# Altium footprint library Connectors.PcbLib: 63 footprints (part 1 of 4)
Each footprint in its own frame and in the unit in brackets; x right, y up, seen from the top. Pads: shape width x height; smd on the part's side, far side on the other; paste and mask are expansions set on the pad; w line width, h text height; cw(c..) or ccw(c..) is an arc to the next point about the centre after c.
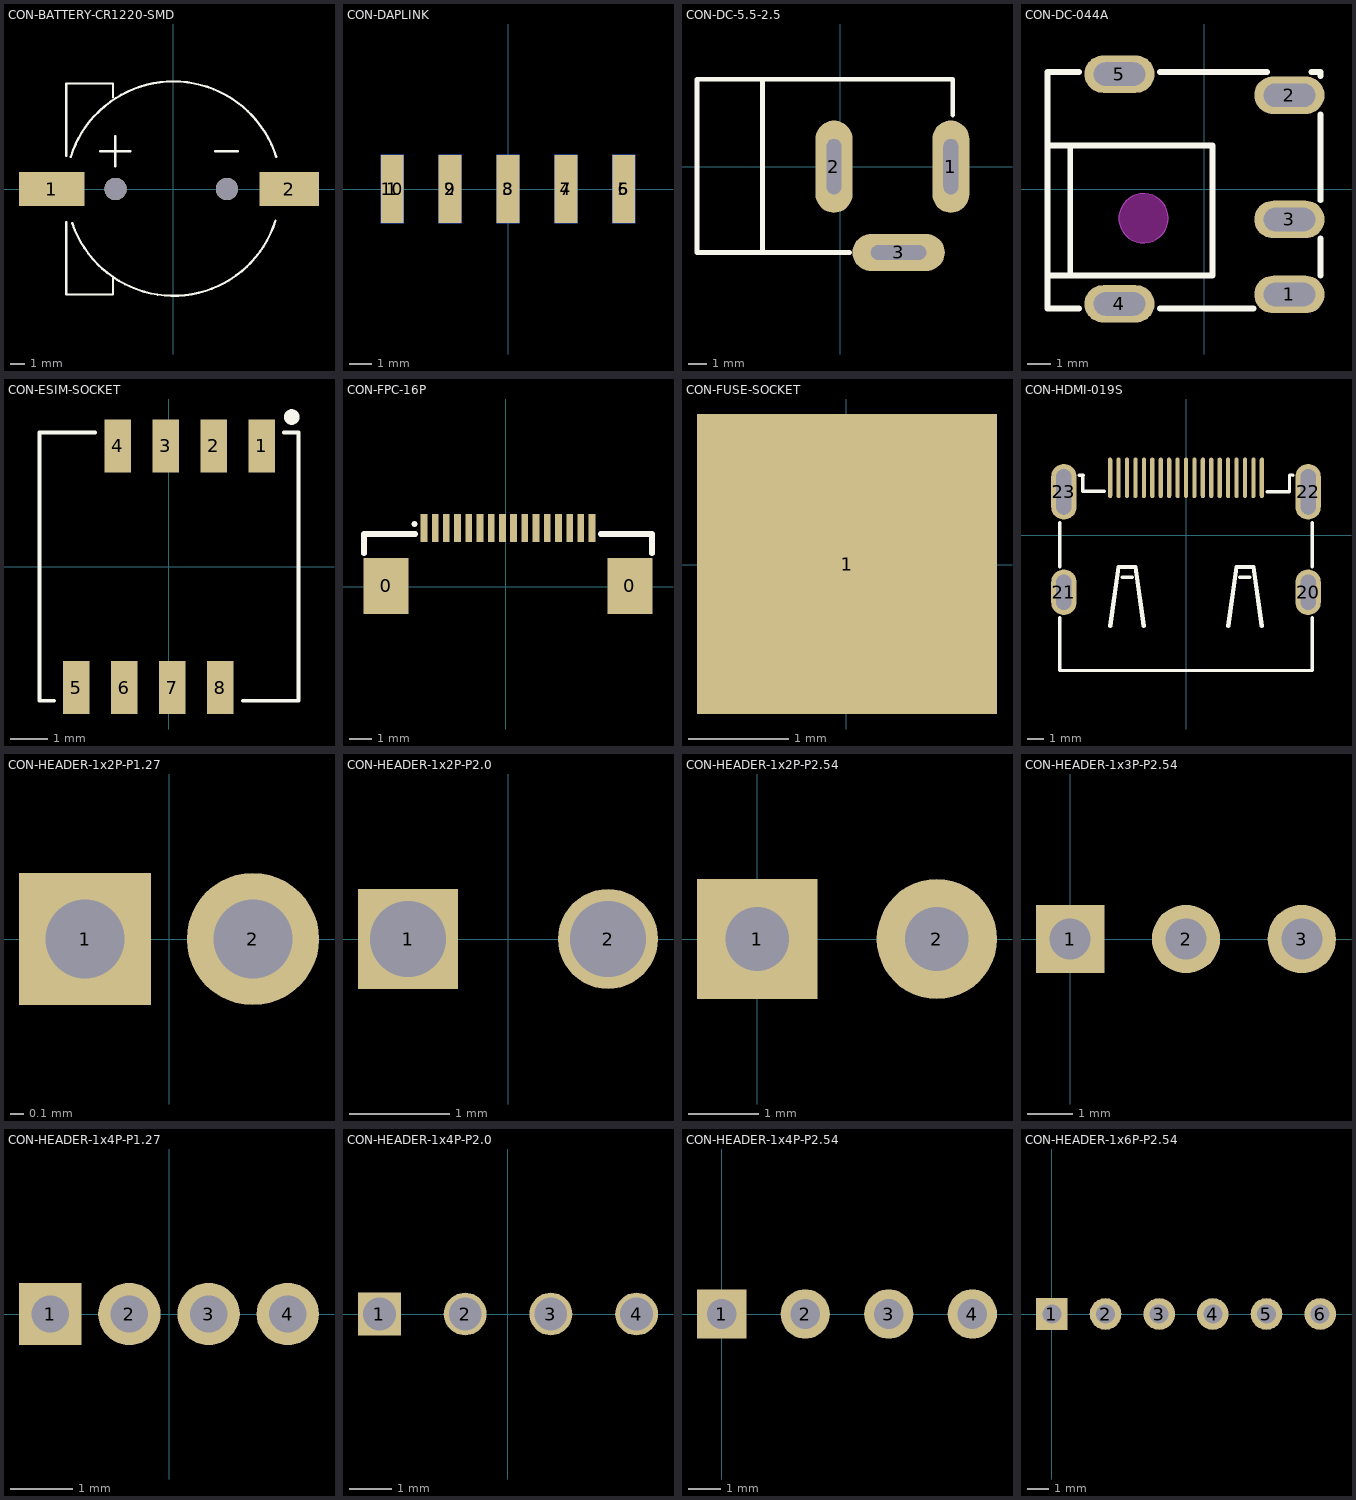
[diagram p0: the footprints below, top view; thin cyan lines are the x and y axes]

## CON-BATTERY-CR1220-SMD [mm] "CR1220 Power Connectors"
pads (4):
  rect 4.4x2.3 smd: 1(-8.2,0)
  rect 4x2.3 smd: 2(7.8,0)
  round 1.5 hole 1.5 unplated: ""(-3.9,0) ""(3.6,0)
Top Overlay:
  lines w0.15: -7.22,-2.231 -7.22,-7.112 -4.064,-7.112 -4.064,-5.912 ; -7.22,2.231 -7.22,7.112 -4.064,7.112 -4.064,6.171 ; -6.911,2.175 cw(c0,0) 6.918,2.154 ; -6.815,-2.297 ccw(c0,0) 6.871,-2.124 ; -4.928,2.54 -2.896,2.54 ; -3.912,1.524 -3.912,3.556 ; 2.819,2.54 4.343,2.54
Mechanical 15:
  circle w0.5: c-3.912,0 r0.25
  circle w0.5: c3.581,0 r0.25
3D body "User Library-Battery Holder for CR1220 SMD.step": height 4.23, standoff -0.52, extent -9.74,-7.37 9.06,7.379

## CON-DAPLINK [mm]
pads (10):
  rect 1x3 smd: 1(-5.08,0) 2(-2.54,0) 3(0,0) 4(2.54,0) 5(5.08,0)
  rect 1x3 smd far side: 6(5.08,0) 7(2.54,0) 8(0,0) 9(-2.54,0) 10(-5.08,0)
3D body "2x5 TH Vert 100mil.step": height 2.01, standoff -3.07, extent -6.35,-1.63 6.35,10.05

## CON-DC-5.5-2.5 [mm] "Connector Power socket"
pads (3):
  oval 2x5 hole 3 slot 0.8 at 0 deg mask+0.051: 1(6,0) 2(-0.33,0)
  oval 5x2 hole 3 slot 0.8 at 90 deg mask+0.051: 3(3.17,-4.65)
Top Overlay:
  lines w0.254: -4.2,-4.65 -4.2,4.65 ; 0.508,-4.65 -7.75,-4.65 -7.75,4.728 6.1,4.728 6.1,2.794
3D body "User Library-A3D-014-00008.step": height 11, standoff -4, extent -8.18,-4.541 6.17,4.609

## CON-DC-044A [mm]
pads (5):
  oval 3x1.6 hole 1 slot 2.2 at 0 deg paste-2539.97 mask+0.051: 1(3.625,-4.5) 2(3.625,4.001) 3(3.625,-1.3) 4(-3.625,-4.9) 5(-3.625,4.9)
Top Overlay:
  lines w0.254: -6.7,-3.7 0.35,-3.7 0.35,1.85 -6.45,1.85 -6.7,1.85 ; -5.726,-3.7 -5.726,1.85 ; -5.345,-5.1 -6.7,-5.1 -6.7,5 -5.345,5 ; -1.905,-5.1 2.087,-5.1 ; -1.905,5 2.678,5 ; 4.572,5 4.95,5 4.95,4.82 ; 4.95,-3.681 4.95,-2.12 ; 4.95,-0.481 4.95,3.181
Keep-Out Layer:
  board cut-out: -1.55,-1.25 -1.55,-1.388 -1.622,-1.655 -1.76,-1.895 -1.955,-2.09 -2.195,-2.229 -2.462,-2.3 -2.738,-2.3 -3.005,-2.229 -3.245,-2.09 -3.44,-1.895 -3.578,-1.655 -3.65,-1.388 -3.65,-1.25 -3.65,-1.112 -3.578,-0.845 -3.44,-0.605 -3.245,-0.41 -3.005,-0.272 -2.738,-0.2 -2.462,-0.2 -2.195,-0.272 -1.955,-0.41 -1.76,-0.605 -1.622,-0.845 -1.55,-1.112 -1.55,-1.25
Keep-Out Layer:
  circle w0.003: c-2.6,-1.25 r1.05
  region: -1.55,-1.25 -1.55,-1.388 -1.622,-1.655 -1.76,-1.895 -1.955,-2.09 -2.195,-2.229 -2.462,-2.3 -2.738,-2.3 -3.005,-2.229 -3.245,-2.09 -3.44,-1.895 -3.578,-1.655 -3.65,-1.388 -3.65,-1.25 -3.65,-1.112 -3.578,-0.845 -3.44,-0.605 -3.245,-0.41 -3.005,-0.272 -2.738,-0.2 -2.462,-0.2 -2.195,-0.272 -1.955,-0.41 -1.76,-0.605 -1.622,-0.845 -1.55,-1.112 -1.55,-1.25
  region: -1.55,-1.25 -1.56,-1.393 -1.589,-1.533 -1.637,-1.668 -1.703,-1.796 -1.785,-1.913 -1.883,-2.017 -1.994,-2.108 -2.117,-2.182 -2.248,-2.239 -2.386,-2.278 -2.528,-2.298 -2.672,-2.298 -2.814,-2.278 -2.952,-2.239 -3.083,-2.182 -3.206,-2.108 -3.317,-2.017 -3.414,-1.913 -3.497,-1.796 -3.563,-1.668 -3.611,-1.533 -3.64,-1.393 -3.65,-1.25 -3.64,-1.107 -3.611,-0.967 -3.563,-0.832 -3.497,-0.704 -3.414,-0.587 -3.317,-0.483 -3.206,-0.392 -3.083,-0.318 -2.952,-0.261 -2.814,-0.222 -2.672,-0.202 -2.528,-0.202 -2.386,-0.222 -2.248,-0.261 -2.117,-0.318 -1.994,-0.392 -1.883,-0.483 -1.785,-0.587 -1.703,-0.704 -1.637,-0.832 -1.589,-0.967 -1.56,-1.107
Mechanical 1:
  circle w0.003: c-2.6,-1.25 r1.05
3D body "DC-IN-TH_DC-044A-20A.x_t": height 7.2, standoff -3, extent -6.689,-5.183 5.211,5.183

## CON-ESIM-SOCKET [mm] "ESIM Card Socket Connectors"
pads (8):
  rect 0.7x1.4 smd: 1(2.45,3.2) 2(1.18,3.2) 3(-0.09,3.2) 4(-1.36,3.2) 5(-2.45,-3.2) 6(-1.18,-3.2) 7(0.09,-3.2) 8(1.36,-3.2)
Top Overlay:
  circle w0.254: c3.251,3.962 r0.08
  lines w0.1: -3.048,-3.55 -3.43,-3.55 -3.43,3.55 -1.956,3.55 ; 1.956,-3.55 3.43,-3.55 3.43,3.55 3.048,3.55

## CON-FPC-16P [mm] "FPC connectors"
pads (18):
  rect 2x2.5 smd mask+0: 0(-5.346,0.045) 0(5.534,0.045)
  rect 0.3x1.25 smd mask+0.05: 1(-3.656,2.619) 2(-3.156,2.619) 3(-2.656,2.619) 4(-2.156,2.619) 5(-1.656,2.619) 6(-1.156,2.619) 7(-0.656,2.619) 8(-0.156,2.619) 9(0.344,2.619) 10(0.844,2.619) 11(1.344,2.619) 12(1.844,2.619) 13(2.344,2.619) 14(2.844,2.619) 15(3.344,2.619) 16(3.844,2.619)
Top Overlay:
  lines w0.254: -6.331,1.498 -6.331,2.355 -4.047,2.355 ; -4.08,2.805 ccw(c-4.188,2.806) -4.08,2.806 ; 4.235,2.355 6.519,2.355 6.519,1.498
3D body "135551.stp": height 1.88, standoff -0.02, extent -6.656,-2.91 6.844,2.389

## CON-FUSE-SOCKET [mm] "CON-FUSE-SOCKET"
pads (1):
  rect 3x3 smd mask+0.05: 1(0.01,0.01)
3D body "User Library-Fuse Leg_2009.STEP": height 9.61, standoff 0, extent -3.038,-3.038 3.058,3.058

## CON-HDMI-019S [mm] "Connectors"
pads (23):
  oval 0.25x2.4 smd: 1(4.501,3.396) 2(4.001,3.396) 3(3.501,3.396) 4(3.001,3.396) 5(2.5,3.396) 6(2,3.396) 7(1.5,3.396) 8(1,3.396) 9(0.5,3.396) 10(0,3.396) 11(-0.5,3.396) 12(-1,3.396) 13(-1.5,3.396) 14(-2,3.396) 15(-2.5,3.396) 16(-3.001,3.396) 17(-3.501,3.396) 18(-4.001,3.396) 19(-4.501,3.396)
  oval 1.5x2.7 hole 0.9 slot 2.1 at 90 deg: 20(7.251,-3.397) 21(-7.251,-3.397)
  oval 1.5x3.3 hole 0.9 slot 2.7 at 90 deg: 22(7.251,2.563) 23(-7.251,2.563)
Top Overlay:
  lines w0.2: -7.5,-4.917 -7.5,-8.036 7.5,-8.036 7.5,-4.917 ; -7.5,-1.875 -7.5,0.743 ; -6.35,3.557 -6.107,3.557 -6.107,3.545 -6.12,3.545 -6.12,2.592 -4.837,2.592 ; -3.8,-2.504 -3.2,-2.504 ; 3.2,-2.504 3.8,-2.504 ; 4.83,2.565 6.08,2.565 6.08,2.575 6.145,2.575 6.145,3.563 6.352,3.563 6.352,3.556 ; 7.5,-1.876 7.5,0.743
  lines w0.254: -4.5,-5.404 -4,-1.904 -3,-1.904 -2.5,-5.404 ; 2.5,-5.404 3,-1.904 4,-1.904 4.5,-5.404
Top Paste:
  drawing of 23 lines, arcs and shapes, not listed
3D body "1827059-1.stp": height 6.08, standoff -2.2, extent -7.5,-8.036 7.5,4.064

## CON-HEADER-1x2P-P1.27 [mm] "CONNECTOR"
pads (2):
  rect 1x1 hole 0.6 mask+0.051: 1(-0.635,0)
  round 1 hole 0.6 mask+0.051: 2(0.635,0)
Mechanical 15:
  region: 0.435,0.2 0.835,0.2 0.835,-0.2 0.435,-0.2
  region: -0.835,0.2 -0.435,0.2 -0.435,-0.2 -0.835,-0.2

## CON-HEADER-1x2P-P2.0 [mm] "CONNECTOR"
pads (2):
  rect 1x1 hole 0.762: 1(-1,0)
  round 1 hole 0.762: 2(1,0)

## CON-HEADER-1x2P-P2.54 [mm] "CONNECTOR"
pads (2):
  rect 1.7x1.7 hole 0.9: 1(0,0)
  round 1.7 hole 0.9: 2(2.54,0)
3D body "User Library-Pin Header Strip.step": height 8.51, standoff -3.68, extent -1.27,-1.46 3.81,1.46

## CON-HEADER-1x3P-P2.54 [mm] "CONNECTOR"
pads (3):
  rect 1.5x1.5 hole 0.9: 1(0,0)
  round 1.5 hole 0.9: 2(2.54,0) 3(5.08,0)

## CON-HEADER-1x4P-P1.27 [mm] "CONNECTOR"
pads (4):
  rect 1x1 hole 0.6 mask+0.051: 1(-1.905,0)
  round 1 hole 0.6 mask+0.051: 2(-0.635,0) 3(0.635,0) 4(1.905,0)
Mechanical 15:
  region: 1.705,0.2 2.105,0.2 2.105,-0.2 1.705,-0.2
  region: 0.435,0.2 0.835,0.2 0.835,-0.2 0.435,-0.2
  region: -0.835,0.2 -0.435,0.2 -0.435,-0.2 -0.835,-0.2
  region: -2.105,0.2 -1.705,0.2 -1.705,-0.2 -2.105,-0.2

## CON-HEADER-1x4P-P2.0 [mm] "CONNECTOR"
pads (4):
  rect 1x1 hole 0.762: 1(-3,0)
  round 1 hole 0.762: 2(-1,0) 3(1,0) 4(3,0)

## CON-HEADER-1x4P-P2.54 [mm] "CONNECTOR"
pads (4):
  rect 1.5x1.5 hole 0.9: 1(0,0)
  round 1.5 hole 0.9: 2(2.54,0) 3(5.08,0) 4(7.62,0)

## CON-HEADER-1x6P-P2.54 [mm] "CONNECTOR"
pads (6):
  rect 1.5x1.5 hole 0.9: 1(0,0)
  round 1.5 hole 0.9: 2(2.54,0) 3(5.08,0) 4(7.62,0) 5(10.16,0) 6(12.7,0)
3D body "User Library-Pin Header Strip.step": height 8.51, standoff -3.68, extent 8.89,-1.46 13.97,1.46
3D body "User Library-Pin Header Strip.step": height 8.51, standoff -3.68, extent -1.27,-1.46 3.81,1.46
3D body "User Library-Pin Header Strip.step": height 8.51, standoff -3.68, extent 3.81,-1.46 8.89,1.46